# Altium footprint library RT9013-33GB.PcbLib: 3 footprints
Each footprint in its own frame and in the unit in brackets; x right, y up, seen from the top. Pads: shape width x height; smd on the part's side, far side on the other; paste and mask are expansions set on the pad; w line width, h text height; cw(c..) or ccw(c..) is an arc to the next point about the centre after c.
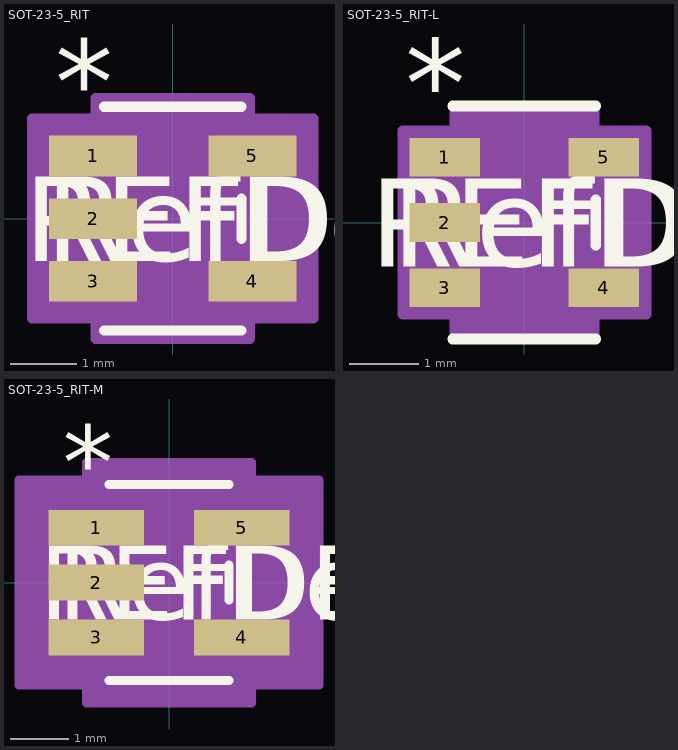
[diagram p0: the footprints below, top view; thin cyan lines are the x and y axes]

## SOT-23-5_RIT [mil]
pads (5):
  rect 52x24 smd paste+0 mask+0: 1(-47,36.99) 2(-47,0) 3(-47,-36.99) 4(47,-36.99) 5(47,36.99)
Top Overlay:
  lines w6: -40.5,-66 40.5,-66 ; -40.5,66 40.5,66 ; 40.5,-11.89 40.5,11.89
  text "REFDES" at -87.5,-25 h50
  text "*" at -69.5,55.99 h50
  text "RefDes" at -75,-25 h50
Mechanical 13:
  lines w0: -12,61 ccw(c0,61) 12,61
  lines w1: -59,-47.99 -59,-25.99 -35.5,-25.99 -35.5,-47.99 -59,-47.99 ; -59,-11 -59,11 -35.5,11 -35.5,-11 -59,-11 ; -59,25.99 -59,47.99 -35.5,47.99 -35.5,25.99 -59,25.99 ; -35.5,-61 35.5,-61 35.5,61 -35.5,61 -35.5,-61 ; 35.5,-47.99 35.5,-25.99 59,-25.99 59,-47.99 35.5,-47.99 ; 35.5,25.99 35.5,47.99 59,47.99 59,25.99 35.5,25.99
  text "*" at -33,8 h50
  text "RefDes2" at -87.5,-25 h50
Mechanical 15:
  region: -45.5,-58.99 -83,-58.99 -83,58.99 -45.5,58.99 -45.5,71 45.5,71 45.5,58.99 83,58.99 83,-58.99 45.5,-58.99 45.5,-71 -45.5,-71
  lines w6: -83,-58.99 -83,58.99 -45.5,58.99 -45.5,71 45.5,71 45.5,58.99 83,58.99 83,-58.99 45.5,-58.99 45.5,-71 -45.5,-71 -45.5,-58.99 -83,-58.99
3D body "SOT-23-5_RIT.step": height 67.09, standoff 0, extent -59.02,-60.98 59.02,60.98

## SOT-23-5_RIT-L [mil]
pads (5):
  rect 40x22 smd paste+0 mask+0: 1(-45,36.99) 2(-45,0) 3(-45,-36.99) 4(45,-36.99) 5(45,36.99)
Top Overlay:
  lines w6: -40.5,-66 40.5,-66 ; -40.5,66 40.5,66 ; 40.5,-12.89 40.5,12.89
  text "REFDES" at -87.5,-25 h50
  text "*" at -67.5,53.99 h50
  text "RefDes" at -75,-25 h50
Mechanical 13:
  lines w0: -12,61 ccw(c0,61) 12,61
  lines w1: -59,-47.99 -59,-25.99 -35.5,-25.99 -35.5,-47.99 -59,-47.99 ; -59,-11 -59,11 -35.5,11 -35.5,-11 -59,-11 ; -59,25.99 -59,47.99 -35.5,47.99 -35.5,25.99 -59,25.99 ; -35.5,-61 35.5,-61 35.5,61 -35.5,61 -35.5,-61 ; 35.5,-47.99 35.5,-25.99 59,-25.99 59,-47.99 35.5,-47.99 ; 35.5,25.99 35.5,47.99 59,47.99 59,25.99 35.5,25.99
  text "*" at -33,8 h50
  text "RefDes2" at -87.5,-25 h50
Mechanical 15:
  region: -39.5,-51.99 -69,-51.99 -69,51.99 -39.5,51.99 -39.5,65 39.5,65 39.5,51.99 69,51.99 69,-51.99 39.5,-51.99 39.5,-65 -39.5,-65
  lines w6: -69,-51.99 -69,51.99 -39.5,51.99 -39.5,65 39.5,65 39.5,51.99 69,51.99 69,-51.99 39.5,-51.99 39.5,-65 -39.5,-65 -39.5,-51.99 -69,-51.99
3D body "SOT-23-5_RIT.step": height 67.09, standoff 0, extent -59.02,-60.98 59.02,60.98

## SOT-23-5_RIT-M [mil]
pads (5):
  rect 64x24 smd paste+0 mask+0: 1(-49,36.99) 2(-49,0) 3(-49,-36.99) 4(49,-36.99) 5(49,36.99)
Top Overlay:
  lines w6: -40.5,-66 40.5,-66 ; -40.5,66 40.5,66 ; 40.5,-11.89 40.5,11.89
  text "REFDES" at -87.5,-25 h50
  text "*" at -71.5,55.99 h50
  text "RefDes" at -75,-25 h50
Mechanical 13:
  lines w0: -12,61 ccw(c0,61) 12,61
  lines w1: -59,-47.99 -59,-25.99 -35.5,-25.99 -35.5,-47.99 -59,-47.99 ; -59,-11 -59,11 -35.5,11 -35.5,-11 -59,-11 ; -59,25.99 -59,47.99 -35.5,47.99 -35.5,25.99 -59,25.99 ; -35.5,-61 35.5,-61 35.5,61 -35.5,61 -35.5,-61 ; 35.5,-47.99 35.5,-25.99 59,-25.99 59,-47.99 35.5,-47.99 ; 35.5,25.99 35.5,47.99 59,47.99 59,25.99 35.5,25.99
  text "*" at -33,8 h50
  text "RefDes2" at -87.5,-25 h50
Mechanical 15:
  region: -55.5,-68.99 -101,-68.99 -101,68.99 -55.5,68.99 -55.5,81 55.5,81 55.5,68.99 101,68.99 101,-68.99 55.5,-68.99 55.5,-81 -55.5,-81
  lines w6: -101,-68.99 -101,68.99 -55.5,68.99 -55.5,81 55.5,81 55.5,68.99 101,68.99 101,-68.99 55.5,-68.99 55.5,-81 -55.5,-81 -55.5,-68.99 -101,-68.99
3D body "SOT-23-5_RIT.step": height 67.09, standoff 0, extent -59.02,-60.98 59.02,60.98